# Altium footprint library PcbLib1.PcbLib: 29 footprints (part 2 of 2)
Each footprint in its own frame and in the unit in brackets; x right, y up, seen from the top. Pads: shape width x height; smd on the part's side, far side on the other; paste and mask are expansions set on the pad; w line width, h text height; cw(c..) or ccw(c..) is an arc to the next point about the centre after c.
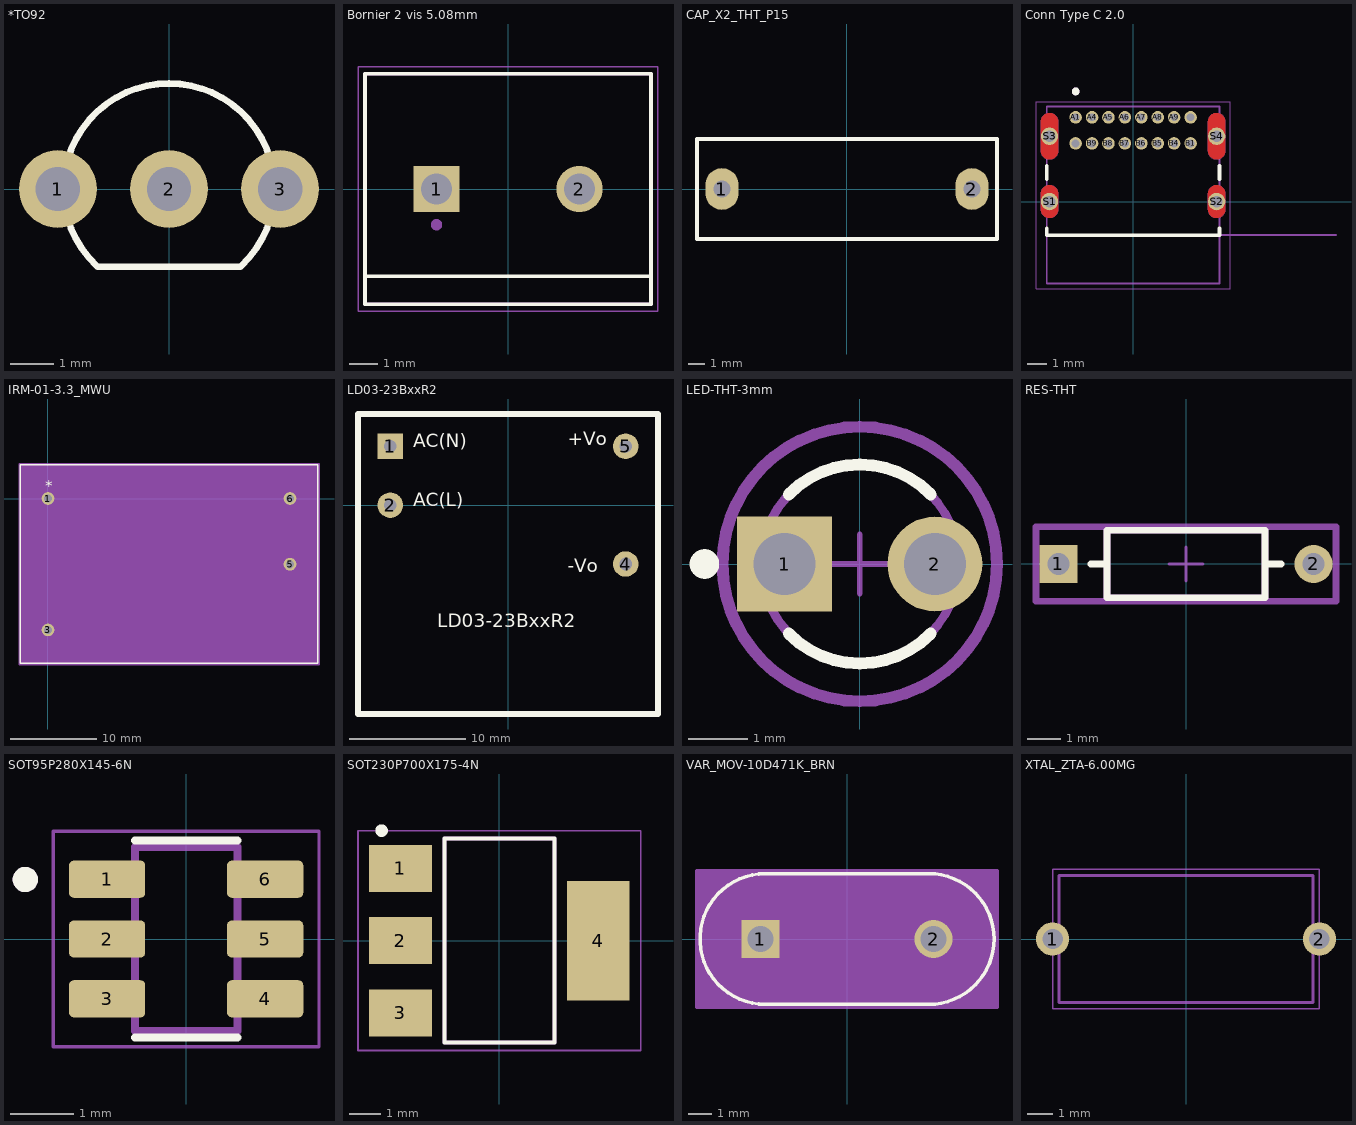
[diagram p1: the footprints below, top view; thin cyan lines are the x and y axes]

## *TO92 [mil]
pads (3):
  round 70 hole 40: 1(-100,0) 2(0,0) 3(100,0)
Top Overlay:
  lines w6: -64.78,-69.48 cw(c0.01,0) -38.63,86.79 cw(c0,0) 38.64,86.79 cw(c-0.01,0) 64.78,-69.48 ; -64.21,-70 64.21,-70
3D body "BS170.STEP": height 209.84, standoff -614.96, extent -87.37,-65 100,77.52

## Bornier 2 vis 5.08mm [mm]
pads (2):
  rect 1.65x1.65 hole 1.1: 1(-2.54,0)
  round 1.65 hole 1.1: 2(2.54,0)
Top Overlay:
  lines w0.127: -5.08,-3.1 5.08,-3.1 ; -5.08,-3.1 -5.08,4.1 5.08,4.1 5.08,-3.1 ; -5.08,-3.1 -5.08,-4.1 5.08,-4.1 5.08,-3.1
Mechanical 4:
  circle w0.2: c-2.54,-1.27 r0.1
  circle w0.2: c-2.54,-1.27 r0.1
  lines w0.127: -5.08,-4.1 -5.08,4.1 ; -5.08,-4.1 5.08,-4.1 ; -5.08,-4.1 -5.08,4.1 ; -5.08,-4.1 5.08,-4.1 ; -5.08,4.1 5.08,4.1 ; -5.08,4.1 5.08,4.1 ; 5.08,-4.1 5.08,4.1 ; 5.08,-4.1 5.08,4.1
Mechanical 16:
  lines w0.05: -5.33,-4.35 -5.33,4.35 5.33,4.35 5.33,-4.35 -5.33,-4.35
3D body "Bornier 2 vis 5.08mm.SLDPRT": height 10.25, standoff -3.25, extent -5.461,-4.191 5.299,4.009

## CAP_X2_THT_P15 [mm]
pads (2):
  oval 2x2.5 hole 1: 1(-7.5,0) 2(7.5,0)
Top Overlay:
  lines w0.254: -9,-3 -9,3 9,3 9,-3 -9,-3

## Conn Type C 2.0 [mm] "*GCT_USB4085-GF-A_REVA4_USB4085-GF-A_REVA4(Primary)"
pads (20):
  round 0.65 hole 0.4: A1(-2.975,4.36) A4(-2.125,4.36) A5(-1.275,4.36) A6(-0.425,4.36) A7(0.425,4.36) A8(1.275,4.36) A9(2.125,4.36) A12(2.975,4.36) B1(2.975,3.01) B4(2.125,3.01) B5(1.275,3.01) B6(0.425,3.01) B7(-0.425,3.01) B8(-1.275,3.01) B9(-2.125,3.01) B12(-2.975,3.01)
  round 0.9 hole 0.6: S1(-4.325,0) S2(4.325,0) S3(-4.325,3.38) S4(4.325,3.38)
Top Layer:
  region: 4.775,4.13 4.775,2.63 4.774,2.606 4.773,2.583 4.769,2.56 4.765,2.536 4.76,2.514 4.753,2.491 4.745,2.469 4.736,2.447 4.726,2.426 4.715,2.405 4.702,2.385 4.689,2.365 4.675,2.347 4.659,2.329 4.643,2.312 4.626,2.296 4.608,2.28 4.59,2.266 4.57,2.253 4.55,2.24 4.529,2.229 4.508,2.219 4.486,2.21 4.464,2.202 4.441,2.195 4.419,2.19 4.395,2.186 4.372,2.182 4.349,2.181 4.325,2.18 4.301,2.181 4.278,2.182 4.255,2.186 4.231,2.19 4.209,2.195 4.186,2.202 4.164,2.21 4.142,2.219 4.121,2.229 4.1,2.24 4.08,2.253 4.06,2.266 4.042,2.28 4.024,2.296 4.007,2.312 3.991,2.329 3.975,2.347 3.961,2.365 3.948,2.385 3.935,2.405 3.924,2.426 3.914,2.447 3.905,2.469 3.897,2.491 3.89,2.514 3.885,2.536 3.881,2.56 3.877,2.583 3.876,2.606 3.875,2.63 3.875,4.13 3.876,4.154 3.877,4.177 3.881,4.2 3.885,4.224 3.89,4.246 3.897,4.269 3.905,4.291 3.914,4.313 3.924,4.334 3.935,4.355 3.948,4.375 3.961,4.394 3.975,4.413 3.991,4.431 4.007,4.448 4.024,4.464 4.042,4.48 4.06,4.494 4.08,4.507 4.1,4.52 4.121,4.531 4.142,4.541 4.164,4.55 4.186,4.558 4.209,4.565 4.231,4.57 4.255,4.574 4.278,4.578 4.301,4.579 4.325,4.58 4.349,4.579 4.372,4.578 4.395,4.574 4.419,4.57 4.441,4.565 4.464,4.558 4.486,4.55 4.508,4.541 4.529,4.531 4.55,4.52 4.57,4.507 4.59,4.494 4.608,4.48 4.626,4.464 4.643,4.448 4.659,4.431 4.675,4.413 4.689,4.394 4.702,4.375 4.715,4.355 4.726,4.334 4.736,4.313 4.745,4.291 4.753,4.269 4.76,4.246 4.765,4.224 4.769,4.2 4.773,4.177 4.774,4.154
  region: -3.875,4.13 -3.875,2.63 -3.876,2.606 -3.877,2.583 -3.881,2.56 -3.885,2.536 -3.89,2.514 -3.897,2.491 -3.905,2.469 -3.914,2.447 -3.924,2.426 -3.935,2.405 -3.948,2.385 -3.961,2.365 -3.975,2.347 -3.991,2.329 -4.007,2.312 -4.024,2.296 -4.042,2.28 -4.06,2.266 -4.08,2.253 -4.1,2.24 -4.121,2.229 -4.142,2.219 -4.164,2.21 -4.186,2.202 -4.209,2.195 -4.231,2.19 -4.255,2.186 -4.278,2.182 -4.301,2.181 -4.325,2.18 -4.349,2.181 -4.372,2.182 -4.395,2.186 -4.419,2.19 -4.441,2.195 -4.464,2.202 -4.486,2.21 -4.508,2.219 -4.529,2.229 -4.55,2.24 -4.57,2.253 -4.59,2.266 -4.608,2.28 -4.626,2.296 -4.643,2.312 -4.659,2.329 -4.675,2.347 -4.689,2.365 -4.702,2.385 -4.715,2.405 -4.726,2.426 -4.736,2.447 -4.745,2.469 -4.753,2.491 -4.76,2.514 -4.765,2.536 -4.769,2.56 -4.773,2.583 -4.774,2.606 -4.775,2.63 -4.775,4.13 -4.774,4.154 -4.773,4.177 -4.769,4.2 -4.765,4.224 -4.76,4.246 -4.753,4.269 -4.745,4.291 -4.736,4.313 -4.726,4.334 -4.715,4.355 -4.702,4.375 -4.689,4.394 -4.675,4.413 -4.659,4.431 -4.643,4.448 -4.626,4.464 -4.608,4.48 -4.59,4.494 -4.57,4.507 -4.55,4.52 -4.529,4.531 -4.508,4.541 -4.486,4.55 -4.464,4.558 -4.441,4.565 -4.419,4.57 -4.395,4.574 -4.372,4.578 -4.349,4.579 -4.325,4.58 -4.301,4.579 -4.278,4.578 -4.255,4.574 -4.231,4.57 -4.209,4.565 -4.186,4.558 -4.164,4.55 -4.142,4.541 -4.121,4.531 -4.1,4.52 -4.08,4.507 -4.06,4.494 -4.042,4.48 -4.024,4.464 -4.007,4.448 -3.991,4.431 -3.975,4.413 -3.961,4.394 -3.948,4.375 -3.935,4.355 -3.924,4.334 -3.914,4.313 -3.905,4.291 -3.897,4.269 -3.89,4.246 -3.885,4.224 -3.881,4.2 -3.877,4.177 -3.876,4.154
  region: 4.775,0.4 4.775,-0.4 4.774,-0.424 4.773,-0.447 4.769,-0.47 4.765,-0.494 4.76,-0.516 4.753,-0.539 4.745,-0.561 4.736,-0.583 4.726,-0.604 4.715,-0.625 4.702,-0.645 4.689,-0.665 4.675,-0.683 4.659,-0.701 4.643,-0.718 4.626,-0.734 4.608,-0.75 4.59,-0.764 4.57,-0.777 4.55,-0.79 4.529,-0.801 4.508,-0.811 4.486,-0.82 4.464,-0.828 4.441,-0.835 4.419,-0.84 4.395,-0.844 4.372,-0.848 4.349,-0.849 4.325,-0.85 4.301,-0.849 4.278,-0.848 4.255,-0.844 4.231,-0.84 4.209,-0.835 4.186,-0.828 4.164,-0.82 4.142,-0.811 4.121,-0.801 4.1,-0.79 4.08,-0.777 4.06,-0.764 4.042,-0.75 4.024,-0.734 4.007,-0.718 3.991,-0.701 3.975,-0.683 3.961,-0.665 3.948,-0.645 3.935,-0.625 3.924,-0.604 3.914,-0.583 3.905,-0.561 3.897,-0.539 3.89,-0.516 3.885,-0.494 3.881,-0.47 3.877,-0.447 3.876,-0.424 3.875,-0.4 3.875,0.4 3.876,0.424 3.877,0.447 3.881,0.47 3.885,0.494 3.89,0.516 3.897,0.539 3.905,0.561 3.914,0.583 3.924,0.604 3.935,0.625 3.948,0.645 3.961,0.665 3.975,0.683 3.991,0.701 4.007,0.718 4.024,0.734 4.042,0.75 4.06,0.764 4.08,0.777 4.1,0.79 4.121,0.801 4.142,0.811 4.164,0.82 4.186,0.828 4.209,0.835 4.231,0.84 4.255,0.844 4.278,0.848 4.301,0.849 4.325,0.85 4.349,0.849 4.372,0.848 4.395,0.844 4.419,0.84 4.441,0.835 4.464,0.828 4.486,0.82 4.508,0.811 4.529,0.801 4.55,0.79 4.57,0.777 4.59,0.764 4.608,0.75 4.626,0.734 4.643,0.718 4.659,0.701 4.675,0.683 4.689,0.665 4.702,0.645 4.715,0.625 4.726,0.604 4.736,0.583 4.745,0.561 4.753,0.539 4.76,0.516 4.765,0.494 4.769,0.47 4.773,0.447 4.774,0.424
  region: -3.875,0.4 -3.875,-0.4 -3.876,-0.424 -3.877,-0.447 -3.881,-0.47 -3.885,-0.494 -3.89,-0.516 -3.897,-0.539 -3.905,-0.561 -3.914,-0.583 -3.924,-0.604 -3.935,-0.625 -3.948,-0.645 -3.961,-0.665 -3.975,-0.683 -3.991,-0.701 -4.007,-0.718 -4.024,-0.734 -4.042,-0.75 -4.06,-0.764 -4.08,-0.777 -4.1,-0.79 -4.121,-0.801 -4.142,-0.811 -4.164,-0.82 -4.186,-0.828 -4.209,-0.835 -4.231,-0.84 -4.255,-0.844 -4.278,-0.848 -4.301,-0.849 -4.325,-0.85 -4.349,-0.849 -4.372,-0.848 -4.395,-0.844 -4.419,-0.84 -4.441,-0.835 -4.464,-0.828 -4.486,-0.82 -4.508,-0.811 -4.529,-0.801 -4.55,-0.79 -4.57,-0.777 -4.59,-0.764 -4.608,-0.75 -4.626,-0.734 -4.643,-0.718 -4.659,-0.701 -4.675,-0.683 -4.689,-0.665 -4.702,-0.645 -4.715,-0.625 -4.726,-0.604 -4.736,-0.583 -4.745,-0.561 -4.753,-0.539 -4.76,-0.516 -4.765,-0.494 -4.769,-0.47 -4.773,-0.447 -4.774,-0.424 -4.775,-0.4 -4.775,0.4 -4.774,0.424 -4.773,0.447 -4.769,0.47 -4.765,0.494 -4.76,0.516 -4.753,0.539 -4.745,0.561 -4.736,0.583 -4.726,0.604 -4.715,0.625 -4.702,0.645 -4.689,0.665 -4.675,0.683 -4.659,0.701 -4.643,0.718 -4.626,0.734 -4.608,0.75 -4.59,0.764 -4.57,0.777 -4.55,0.79 -4.529,0.801 -4.508,0.811 -4.486,0.82 -4.464,0.828 -4.441,0.835 -4.419,0.84 -4.395,0.844 -4.372,0.848 -4.349,0.849 -4.325,0.85 -4.301,0.849 -4.278,0.848 -4.255,0.844 -4.231,0.84 -4.209,0.835 -4.186,0.828 -4.164,0.82 -4.142,0.811 -4.121,0.801 -4.1,0.79 -4.08,0.777 -4.06,0.764 -4.042,0.75 -4.024,0.734 -4.007,0.718 -3.991,0.701 -3.975,0.683 -3.961,0.665 -3.948,0.645 -3.935,0.625 -3.924,0.604 -3.914,0.583 -3.905,0.561 -3.897,0.539 -3.89,0.516 -3.885,0.494 -3.881,0.47 -3.877,0.447 -3.876,0.424
Bottom Layer:
  region: 3.875,4.13 3.875,2.63 3.876,2.606 3.877,2.583 3.881,2.56 3.885,2.536 3.89,2.514 3.897,2.491 3.905,2.469 3.914,2.447 3.924,2.426 3.935,2.405 3.948,2.385 3.961,2.365 3.975,2.347 3.991,2.329 4.007,2.312 4.024,2.296 4.042,2.28 4.06,2.266 4.08,2.253 4.1,2.24 4.121,2.229 4.142,2.219 4.164,2.21 4.186,2.202 4.209,2.195 4.231,2.19 4.255,2.186 4.278,2.182 4.301,2.181 4.325,2.18 4.349,2.181 4.372,2.182 4.395,2.186 4.419,2.19 4.441,2.195 4.464,2.202 4.486,2.21 4.508,2.219 4.529,2.229 4.55,2.24 4.57,2.253 4.59,2.266 4.608,2.28 4.626,2.296 4.643,2.312 4.659,2.329 4.675,2.347 4.689,2.365 4.702,2.385 4.715,2.405 4.726,2.426 4.736,2.447 4.745,2.469 4.753,2.491 4.76,2.514 4.765,2.536 4.769,2.56 4.773,2.583 4.774,2.606 4.775,2.63 4.775,4.13 4.774,4.154 4.773,4.177 4.769,4.2 4.765,4.224 4.76,4.246 4.753,4.269 4.745,4.291 4.736,4.313 4.726,4.334 4.715,4.355 4.702,4.375 4.689,4.394 4.675,4.413 4.659,4.431 4.643,4.448 4.626,4.464 4.608,4.48 4.59,4.494 4.57,4.507 4.55,4.52 4.529,4.531 4.508,4.541 4.486,4.55 4.464,4.558 4.441,4.565 4.419,4.57 4.395,4.574 4.372,4.578 4.349,4.579 4.325,4.58 4.301,4.579 4.278,4.578 4.255,4.574 4.231,4.57 4.209,4.565 4.186,4.558 4.164,4.55 4.142,4.541 4.121,4.531 4.1,4.52 4.08,4.507 4.06,4.494 4.042,4.48 4.024,4.464 4.007,4.448 3.991,4.431 3.975,4.413 3.961,4.394 3.948,4.375 3.935,4.355 3.924,4.334 3.914,4.313 3.905,4.291 3.897,4.269 3.89,4.246 3.885,4.224 3.881,4.2 3.877,4.177 3.876,4.154
  region: -4.775,4.13 -4.775,2.63 -4.774,2.606 -4.773,2.583 -4.769,2.56 -4.765,2.536 -4.76,2.514 -4.753,2.491 -4.745,2.469 -4.736,2.447 -4.726,2.426 -4.715,2.405 -4.702,2.385 -4.689,2.365 -4.675,2.347 -4.659,2.329 -4.643,2.312 -4.626,2.296 -4.608,2.28 -4.59,2.266 -4.57,2.253 -4.55,2.24 -4.529,2.229 -4.508,2.219 -4.486,2.21 -4.464,2.202 -4.441,2.195 -4.419,2.19 -4.395,2.186 -4.372,2.182 -4.349,2.181 -4.325,2.18 -4.301,2.181 -4.278,2.182 -4.255,2.186 -4.231,2.19 -4.209,2.195 -4.186,2.202 -4.164,2.21 -4.142,2.219 -4.121,2.229 -4.1,2.24 -4.08,2.253 -4.06,2.266 -4.042,2.28 -4.024,2.296 -4.007,2.312 -3.991,2.329 -3.975,2.347 -3.961,2.365 -3.948,2.385 -3.935,2.405 -3.924,2.426 -3.914,2.447 -3.905,2.469 -3.897,2.491 -3.89,2.514 -3.885,2.536 -3.881,2.56 -3.877,2.583 -3.876,2.606 -3.875,2.63 -3.875,4.13 -3.876,4.154 -3.877,4.177 -3.881,4.2 -3.885,4.224 -3.89,4.246 -3.897,4.269 -3.905,4.291 -3.914,4.313 -3.924,4.334 -3.935,4.355 -3.948,4.375 -3.961,4.394 -3.975,4.413 -3.991,4.431 -4.007,4.448 -4.024,4.464 -4.042,4.48 -4.06,4.494 -4.08,4.507 -4.1,4.52 -4.121,4.531 -4.142,4.541 -4.164,4.55 -4.186,4.558 -4.209,4.565 -4.231,4.57 -4.255,4.574 -4.278,4.578 -4.301,4.579 -4.325,4.58 -4.349,4.579 -4.372,4.578 -4.395,4.574 -4.419,4.57 -4.441,4.565 -4.464,4.558 -4.486,4.55 -4.508,4.541 -4.529,4.531 -4.55,4.52 -4.57,4.507 -4.59,4.494 -4.608,4.48 -4.626,4.464 -4.643,4.448 -4.659,4.431 -4.675,4.413 -4.689,4.394 -4.702,4.375 -4.715,4.355 -4.726,4.334 -4.736,4.313 -4.745,4.291 -4.753,4.269 -4.76,4.246 -4.765,4.224 -4.769,4.2 -4.773,4.177 -4.774,4.154
  region: 3.875,0.4 3.875,-0.4 3.876,-0.424 3.877,-0.447 3.881,-0.47 3.885,-0.494 3.89,-0.516 3.897,-0.539 3.905,-0.561 3.914,-0.583 3.924,-0.604 3.935,-0.625 3.948,-0.645 3.961,-0.665 3.975,-0.683 3.991,-0.701 4.007,-0.718 4.024,-0.734 4.042,-0.75 4.06,-0.764 4.08,-0.777 4.1,-0.79 4.121,-0.801 4.142,-0.811 4.164,-0.82 4.186,-0.828 4.209,-0.835 4.231,-0.84 4.255,-0.844 4.278,-0.848 4.301,-0.849 4.325,-0.85 4.349,-0.849 4.372,-0.848 4.395,-0.844 4.419,-0.84 4.441,-0.835 4.464,-0.828 4.486,-0.82 4.508,-0.811 4.529,-0.801 4.55,-0.79 4.57,-0.777 4.59,-0.764 4.608,-0.75 4.626,-0.734 4.643,-0.718 4.659,-0.701 4.675,-0.683 4.689,-0.665 4.702,-0.645 4.715,-0.625 4.726,-0.604 4.736,-0.583 4.745,-0.561 4.753,-0.539 4.76,-0.516 4.765,-0.494 4.769,-0.47 4.773,-0.447 4.774,-0.424 4.775,-0.4 4.775,0.4 4.774,0.424 4.773,0.447 4.769,0.47 4.765,0.494 4.76,0.516 4.753,0.539 4.745,0.561 4.736,0.583 4.726,0.604 4.715,0.625 4.702,0.645 4.689,0.665 4.675,0.683 4.659,0.701 4.643,0.718 4.626,0.734 4.608,0.75 4.59,0.764 4.57,0.777 4.55,0.79 4.529,0.801 4.508,0.811 4.486,0.82 4.464,0.828 4.441,0.835 4.419,0.84 4.395,0.844 4.372,0.848 4.349,0.849 4.325,0.85 4.301,0.849 4.278,0.848 4.255,0.844 4.231,0.84 4.209,0.835 4.186,0.828 4.164,0.82 4.142,0.811 4.121,0.801 4.1,0.79 4.08,0.777 4.06,0.764 4.042,0.75 4.024,0.734 4.007,0.718 3.991,0.701 3.975,0.683 3.961,0.665 3.948,0.645 3.935,0.625 3.924,0.604 3.914,0.583 3.905,0.561 3.897,0.539 3.89,0.516 3.885,0.494 3.881,0.47 3.877,0.447 3.876,0.424
  region: -4.775,0.4 -4.775,-0.4 -4.774,-0.424 -4.773,-0.447 -4.769,-0.47 -4.765,-0.494 -4.76,-0.516 -4.753,-0.539 -4.745,-0.561 -4.736,-0.583 -4.726,-0.604 -4.715,-0.625 -4.702,-0.645 -4.689,-0.665 -4.675,-0.683 -4.659,-0.701 -4.643,-0.718 -4.626,-0.734 -4.608,-0.75 -4.59,-0.764 -4.57,-0.777 -4.55,-0.79 -4.529,-0.801 -4.508,-0.811 -4.486,-0.82 -4.464,-0.828 -4.441,-0.835 -4.419,-0.84 -4.395,-0.844 -4.372,-0.848 -4.349,-0.849 -4.325,-0.85 -4.301,-0.849 -4.278,-0.848 -4.255,-0.844 -4.231,-0.84 -4.209,-0.835 -4.186,-0.828 -4.164,-0.82 -4.142,-0.811 -4.121,-0.801 -4.1,-0.79 -4.08,-0.777 -4.06,-0.764 -4.042,-0.75 -4.024,-0.734 -4.007,-0.718 -3.991,-0.701 -3.975,-0.683 -3.961,-0.665 -3.948,-0.645 -3.935,-0.625 -3.924,-0.604 -3.914,-0.583 -3.905,-0.561 -3.897,-0.539 -3.89,-0.516 -3.885,-0.494 -3.881,-0.47 -3.877,-0.447 -3.876,-0.424 -3.875,-0.4 -3.875,0.4 -3.876,0.424 -3.877,0.447 -3.881,0.47 -3.885,0.494 -3.89,0.516 -3.897,0.539 -3.905,0.561 -3.914,0.583 -3.924,0.604 -3.935,0.625 -3.948,0.645 -3.961,0.665 -3.975,0.683 -3.991,0.701 -4.007,0.718 -4.024,0.734 -4.042,0.75 -4.06,0.764 -4.08,0.777 -4.1,0.79 -4.121,0.801 -4.142,0.811 -4.164,0.82 -4.186,0.828 -4.209,0.835 -4.231,0.84 -4.255,0.844 -4.278,0.848 -4.301,0.849 -4.325,0.85 -4.349,0.849 -4.372,0.848 -4.395,0.844 -4.419,0.84 -4.441,0.835 -4.464,0.828 -4.486,0.82 -4.508,0.811 -4.529,0.801 -4.55,0.79 -4.57,0.777 -4.59,0.764 -4.608,0.75 -4.626,0.734 -4.643,0.718 -4.659,0.701 -4.675,0.683 -4.689,0.665 -4.702,0.645 -4.715,0.625 -4.726,0.604 -4.736,0.583 -4.745,0.561 -4.753,0.539 -4.76,0.516 -4.765,0.494 -4.769,0.47 -4.773,0.447 -4.774,0.424
Top Overlay:
  circle w0.2: c-2.975,5.7 r0.1
  lines w0.2: -4.47,-1.39 -4.47,-1.74 4.47,-1.74 4.47,-1.39 ; -4.47,1.17 -4.47,1.85 ; 4.47,1.17 4.47,1.85
Top Solder:
  drawing of 4 lines, arcs and shapes, not listed
Bottom Solder:
  drawing of 4 lines, arcs and shapes, not listed
Mechanical 1:
  lines w0: -4.625,-0.4 ccw(c-4.325,-0.4) -4.325,-0.7 ccw(c-4.325,-0.4) -4.025,-0.4 -4.025,0.4 ccw(c-4.325,0.4) -4.325,0.7 ccw(c-4.325,0.4) -4.625,0.4 -4.625,-0.4 ; -4.625,2.63 ccw(c-4.325,2.63) -4.325,2.33 ccw(c-4.325,2.63) -4.025,2.63 -4.025,4.13 ccw(c-4.325,4.13) -4.325,4.43 ccw(c-4.325,4.13) -4.625,4.13 -4.625,2.63 ; 4.025,-0.4 ccw(c4.325,-0.4) 4.325,-0.7 ccw(c4.325,-0.4) 4.625,-0.4 4.625,0.4 ccw(c4.325,0.4) 4.325,0.7 ccw(c4.325,0.4) 4.025,0.4 4.025,-0.4 ; 4.025,2.63 ccw(c4.325,2.63) 4.325,2.33 ccw(c4.325,2.63) 4.625,2.63 4.625,4.13 ccw(c4.325,4.13) 4.325,4.43 ccw(c4.325,4.13) 4.025,4.13 4.025,2.63
Mechanical 4:
  circle w0.2: c-2.975,5.7 r0.1
  circle w0.2: c-2.975,5.7 r0.1
  lines w0.1: -4.47,-4.25 -4.47,-1.74 ; -4.47,-4.25 4.47,-4.25 ; -4.47,-4.25 -4.47,-1.74 ; -4.47,-4.25 4.47,-4.25 ; -4.47,-1.74 -4.47,4.92 ; -4.47,-1.74 10.5,-1.74 -4.47,-1.74 ; -4.47,-1.74 -4.47,4.92 ; -4.47,4.92 4.47,4.92 ; -4.47,4.92 4.47,4.92 ; 4.47,-4.25 4.47,4.92 ; 4.47,-4.25 4.47,4.92
  text "PCB EDGE" at 5.315,-1.82 h1.88
  text "PCB EDGE" at 5.315,-1.82 h1.88
Mechanical 16:
  lines w0.05: -5.025,-4.5 -5.025,5.17 5.025,5.17 5.025,-4.5 -5.025,-4.5
3D body "usb4085-gf-a.stp": height 3.46, standoff -2.1, extent -4.47,-4.217 4.47,4.953

## IRM-01-3.3_MWU [mil]
pads (4):
  round 58 hole 38 paste-99999 mask+0: 1(0,0) 3(0,-598.43) 5(1102.36,-299.21) 6(1102.36,0)
Top Overlay:
  lines w6: -126.82,-751.21 1229.18,-751.21 1229.18,152.79 -126.82,152.79 -126.82,-751.21
  text "*" at -12.5,34 h50
  text ".Designator" at 413.68,-324.21 h50
Top 3D Body:
  lines w1: 539.18,147.79 ccw(c551.18,147.79) 563.18,147.79 ; -121.82,-746.21 1224.18,-746.21 1224.18,147.79 -121.82,147.79 -121.82,-746.21 ; -121.82,-617.43 -121.82,-579.43 -19,-579.43 -19,-617.43 -121.82,-617.43 ; -121.82,-19 -121.82,19 -19,19 -19,-19 -121.82,-19 ; 1121.36,-318.21 1224.18,-318.21 1224.18,-280.21 1121.36,-280.21 1121.36,-318.21 ; 1121.36,-19 1224.18,-19 1224.18,19 1121.36,19 1121.36,-19
  text ".Designator" at 413.68,-324.21 h50
  text "*" at -124.32,-25 h50
Top Courtyard:
  region: 1234.18,-637.43 1234.18,39 1234.18,157.79 -131.82,157.79 -131.82,39 -131.82,-637.43 -131.82,-756.21 1234.18,-756.21
  lines w6: -131.82,-756.21 -131.82,-637.43 -131.82,39 -131.82,157.79 1234.18,157.79 1234.18,39 1234.18,-637.43 1234.18,-756.21 -131.82,-756.21
3D body "IRM-01-33_MWU.step": height 615.12, standoff -100, extent -5,-746.22 1111.97,147.8

## LD03-23BxxR2 [mm]
pads (4):
  rect 2.2x2.2 hole 1.1: 1(-10.16,5.08)
  round 2.2 hole 1.1: 2(-10.16,0) 4(10.16,-5.08) 5(10.16,5.08)
Top Overlay:
  lines w0.5: -12.95,-18.03 12.95,-18.03 12.95,7.87 -12.95,7.87 -12.95,-18.03
  text "AC(N)" at -8.16,4.594 h2
  text "AC(L)" at -8.16,-0.486 h2
  text "+Vo" at 5.16,4.781 h2
  text "-Vo" at 5.16,-6.177 h2
  text "LD03-23BxxR2" at -6.096,-10.922 h2
3D body "LD03-23BxxR2.stp": height 17.7, standoff -4.1, extent -12.827,-17.78 12.573,7.62

## LED-THT-3mm [mm]
pads (2):
  rect 1.6x1.6 hole 1.05 paste-2539.97 mask+0: 1(-1.27,0)
  round 1.6 hole 1.05 paste-2539.97 mask+0: 2(1.27,0)
Top Overlay:
  circle w0.25: c-2.625,0 r0.125
  lines w0.2: -1.2,-1.175 ccw(c0,-0.006) 1.2,-1.175 ; -1.2,1.175 cw(c0,0.006) 1.2,1.175
Top Component Center:
  lines w0.1: -0.5,0 0.5,0 ; 0,-0.5 0,0.5
Top Assembly:
  text ".Designator" at 0,0.188 h1
Top 3D Body:
  circle w0.15: c0,0 r1.675
Top Courtyard:
  lines w0.2: -2.319,0 cw(c0,0) 2.319,0 cw(c0,0) -2.319,0
3D body "Diode_Vishay_VSLB3940_eec.STEP": height 0.25, standoff 0, extent -2.319,-2.319 2.319,2.319

## PCBComponent_1 [mm]

## RES-THT [mm]
pads (2):
  rect 1.15x1.15 hole 0.65 paste-2539.97 mask+0: 1(-3.835,0)
  round 1.15 hole 0.65 paste-2539.97 mask+0: 2(3.835,0)
Top Overlay:
  lines w0.2: -2.86,0 -2.375,0 ; 2.375,0 2.86,0 ; -2.375,-1.015 -2.375,1.015 2.375,1.015 2.375,-1.015 -2.375,-1.015
Top Component Center:
  lines w0.1: -0.5,0 0.5,0 ; 0,-0.5 0,0.5
Top Assembly:
  lines w0.2: -4.51,-1.115 -4.51,1.115 4.51,1.115 4.51,-1.115 -4.51,-1.115
  text ".Designator" at 0,0.188 h1
Top 3D Body:
  lines w0.2: -2.375,-1.015 -2.375,1.015 2.375,1.015 2.375,-1.015 -2.375,-1.015
Top Courtyard:
  lines w0.2: -4.51,-1.115 -4.51,1.115 4.51,1.115 4.51,-1.115 -4.51,-1.115
3D body "Res_Vishay_CMF5073K200FHEB_eec.STEP": height 0.25, standoff 0, extent -4.51,-1.115 4.51,1.115

## SOT95P280X145-6N [mm]
pads (6):
  rrect25% 1.21x0.59 smd: 1(-1.255,0.95) 2(-1.255,0) 3(-1.255,-0.95) 4(1.255,-0.95) 5(1.255,0) 6(1.255,0.95)
Top Overlay:
  circle w0.2: c-2.555,0.945 r0.1
  lines w0.127: -0.813,-1.565 0.813,-1.565 ; -0.813,1.565 0.813,1.565
Top 3D Body:
  circle w0.2: c-2.555,0.945 r0.1
  lines w0.127: -0.813,-1.462 -0.813,1.462 0.813,1.462 0.813,-1.462 -0.813,-1.462
Top Courtyard:
  lines w0.05: -2.11,-1.713 2.11,-1.713 2.11,1.713 -2.11,1.713 -2.11,-1.713
3D body "step_temp.STEP": height 1.42, standoff -0.03, extent -1.4,-1.462 1.4,1.462

## SOT230P700X175-4N [mm]
pads (4):
  rect 2x1.5 smd paste+0 mask+0.102: 1(-3.15,2.3) 2(-3.15,0) 3(-3.15,-2.3)
  rect 2x3.8 smd paste+0 mask+0.102: 4(3.15,0)
Top Overlay:
  circle w0.2: c-3.75,3.5 r0.1
  lines w0.127: -1.75,-3.25 1.75,-3.25 1.75,3.25 -1.75,3.25 -1.75,-3.25
Top 3D Body:
  lines w0.127: -1.75,-3.25 1.75,-3.25 1.75,3.25 -1.75,3.25 -1.75,-3.25
Top Courtyard:
  lines w0.05: -4.5,-3.5 4.5,-3.5 4.5,3.5 -4.5,3.5 -4.5,-3.5
3D body "step_temp.STEP": height 1.57, standoff -0.08, extent -3.5,-3.452 3.5,3.048

## VAR_MOV-10D471K_BRN [mil]
pads (2):
  rect 65x65 hole 45 paste-99999 mask+0: 1(-147.64,0)
  round 65 hole 45 paste-99999 mask+0: 2(147.64,0)
Top Overlay:
  lines w6: -139.5,-111.5 cw(c-139.5,0) -139.5,111.5 139.5,111.5 cw(c139.5,0) 251,0 cw(c139.5,0) 139.5,-111.5 -139.5,-111.5
  text ".Designator" at -137.5,-25 h50
Top 3D Body:
  lines w1: -139.5,-106.5 cw(c-139.5,0) -139.5,106.5 139.5,106.5 cw(c139.5,0) 139.5,-106.5 -139.5,-106.5
  text ".Designator" at -137.5,-25 h50
Top Courtyard:
  region: 256,-116.5 -256,-116.5 -256,116.5 256,116.5
  lines w6: -256,-116.5 -256,116.5 256,116.5 256,-116.5 -256,-116.5
3D body "VAR_MOV-10D471K_BRN.step": height 610, standoff -200.08, extent -245.98,-106.5 245.98,106.49

## XTAL_ZTA-6.00MG [mm]
pads (2):
  round 1.308 hole 0.8: 1(-5.25,0) 2(5.25,0)
Top 3D Body:
  lines w0.127: -5,-2.5 5,-2.5 5,2.5 -5,2.5
Top Courtyard:
  lines w0.05: -5.25,-2.75 -5.25,2.75 5.25,2.75 5.25,-2.75 -5.25,-2.75
Bottom Courtyard:
  lines w0.127: -5,-2.5 -5,2.5
3D body "step_temp.STEP": height 2.6, standoff -27.75, extent -5.63,-1.295 5.63,1.295